# Altium footprint library Verdin Development Board.PcbLib: 154 footprints (part 6 of 10)
Each footprint in its own frame and in the unit in brackets; x right, y up, seen from the top. Pads: shape width x height; smd on the part's side, far side on the other; paste and mask are expansions set on the pad; w line width, h text height; cw(c..) or ccw(c..) is an arc to the next point about the centre after c.
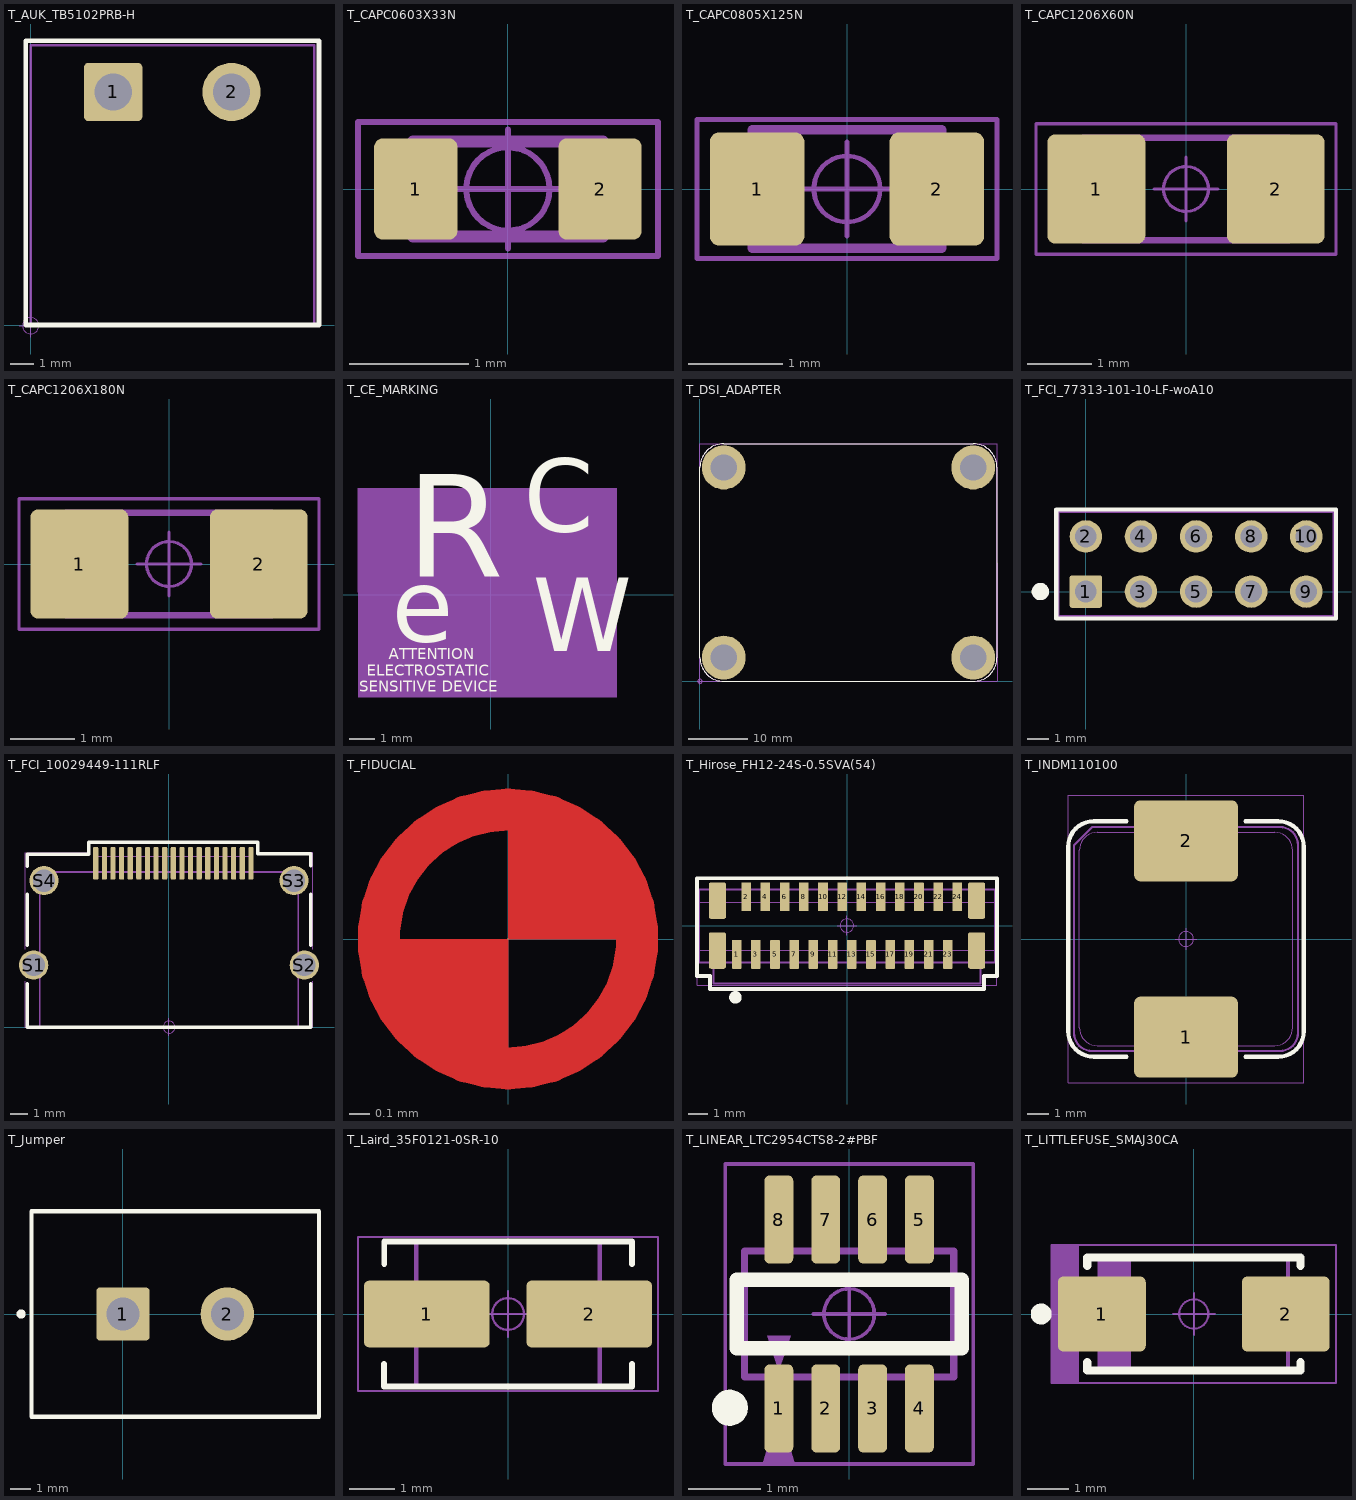
[diagram p5: the footprints below, top view; thin cyan lines are the x and y axes]

## T_AUK_TB5102PRB-H [mm]
pads (2):
  rrect15% 2.5x2.5 hole 1.6: 1(3.54,10)
  round 2.5 hole 1.6: 2(8.62,10)
Top Overlay:
  lines w0.2: -0.21,0 12.37,0 12.37,12.2 -0.21,12.2 -0.21,0
Top Component Outline:
  lines w0.05: 0,0 12.16,0 12.16,12 0,12 0,0
Top 3D Body:
  lines w0.001: 0,0 12.16,0 12.16,12 0,12 0,0
Top Dimensions:
  lines w0.1: 0,0 12.16,0 12.16,12 0,12 0,0
Top Component Center:
  circle w0.05: c0,-0.025 r0.35
  lines w0.05: -0.5,-0.025 0.5,-0.025 ; 0,-0.525 0,0.475
Top Assembly:
  text ".Designator" at 4.05,12.775 h0.75
3D body "c-796638-2-c3-3d.stp": height 8.37, standoff -3.48, extent -0.16,0 11.82,12

## T_CAPC0603X33N [mm]
pads (2):
  rrect20% 0.7x0.85 smd: 1(-0.775,0) 2(0.775,0)
Top Component Outline:
  lines w0.05: -1.261,-0.563 1.262,-0.563 1.262,0.563 -1.261,0.563 -1.261,-0.563
Top 3D Body:
  lines w0.001: -0.8,-0.4 0.8,-0.4 0.8,0.4 -0.8,0.4 -0.8,-0.4
Top Dimensions:
  lines w0.1: -0.8,-0.4 0.8,-0.4 0.8,0.4 -0.8,0.4 -0.8,-0.4
Top Component Center:
  circle w0.05: c0,0 r0.35
  lines w0.05: -0.5,0 0.5,0 ; 0,-0.5 0,0.5
Top Assembly:
  text ".Designator" at -1.3,0.8 h0.75
3D body "User Library-CAPC1608X09.step": height 0.9, standoff 0, extent -0.8,-0.4 0.8,0.4

## T_CAPC0805X125N [mm]
pads (2):
  rrect20% 1x1.2 smd: 1(-0.95,0) 2(0.95,0)
Top Component Outline:
  lines w0.05: -1.586,-0.736 1.586,-0.736 1.586,0.736 -1.586,0.736 -1.586,-0.736
Top 3D Body:
  lines w0.001: -1,-0.625 -1,0.625 1,0.625 1,-0.625 -1,-0.625
Top Dimensions:
  lines w0.1: -1,-0.625 1,-0.625 1,0.625 -1,0.625 -1,-0.625
Top Component Center:
  circle w0.05: c0,0 r0.35
  lines w0.05: -0.5,0 0.5,0 ; 0,-0.5 0,0.5
Top Assembly:
  text ".Designator" at -1.225,0.95 h0.75
3D body "User Library-CAPC2013X10.STEP": height 1, standoff 0, extent -1,-0.625 1,0.625

## T_CAPC1206X60N [mm]
pads (2):
  rrect15% 1.524x1.7 smd: 1(-1.397,0) 2(1.397,0)
Top Component Outline:
  lines w0.05: -2.337,-1.016 -2.337,1.016 2.336,1.016 2.336,-1.016 -2.337,-1.016
Top Dimensions:
  lines w0.1: -1.6,-0.8 -1.6,0.8 1.6,0.8 1.6,-0.8 -1.6,-0.8
Top Component Center:
  circle w0.05: c0,0 r0.35
  lines w0.05: -0.5,0 0.5,0 ; 0,-0.5 0,0.5
Top Assembly:
  text ".Designator" at -1.475,1.325 h0.75
3D body "c1206c225k5ractu.stp": height 1.8, standoff 0, extent -1.7,-0.9 1.7,0.9

## T_CAPC1206X180N [mm]
pads (2):
  rrect15% 1.524x1.7 smd: 1(-1.397,0) 2(1.397,0)
Top Component Outline:
  lines w0.05: -2.337,-1.016 -2.337,1.016 2.336,1.016 2.336,-1.016 -2.337,-1.016
Top 3D Body:
  lines w0.01: -1.6,-0.8 1.6,-0.8 1.6,0.8 -1.6,0.8 -1.6,-0.8
Top Dimensions:
  lines w0.1: -1.6,-0.8 -1.6,0.8 1.6,0.8 1.6,-0.8 -1.6,-0.8
Top Component Center:
  circle w0.05: c0,0 r0.35
  lines w0.05: -0.5,0 0.5,0 ; 0,-0.5 0,0.5
Top Assembly:
  text ".Designator" at -1.475,1.325 h0.75
3D body "capacitor 1206.step": height 1, standoff 0, extent -1.6,-0.8 1.6,0.8

## T_CE_MARKING [mm] "Silkscreen CE Marking"
Top Overlay:
  text "R" at -3.353,-0.61 h7
  text "C" at 1.329,1.549 h5
  text "e" at -3.941,-2.819 h5
  text "W" at 1.676,-3.2 h5
  text "SENSITIVE DEVICE" at -5.232,-4.013 h0.75
  text "ELECTROSTATIC" at -4.939,-3.378 h0.75
  text "ATTENTION" at -4.06,-2.718 h0.75
Top 3D Body:
  region: -5.283,4.242 5.029,4.242 5.029,-4.089 -5.283,-4.089

## T_DSI_ADAPTER [mm]
pads (4):
  round 7.4 / inner round 5.3 / far side round 0 hole 4.4 unplated: ""(4,4) ""(4,36) ""(46,4) ""(46,36)
Top Overlay:
  lines w0.2: 0,4 ccw(c4,4) 4,0 46,0 ccw(c46,4) 50,4 50,36 ccw(c46,36) 46,40 4,40 ccw(c4,36) 0,36 0,4
Top Paste:
  drawing of 16 lines, arcs and shapes, not listed
Top 3D Body:
  lines w0.01: 0,0 50,0 50,40 0,40 0,0
Top Dimensions:
  lines w0.1: 0,4 ccw(c4,4) 4,0 46,0 ccw(c46,4) 50,4 50,36 ccw(c46,36) 46,40 4,40 ccw(c4,36) 0,36 0,4
Top Component Center:
  circle w0.05: c46,4 r0.35
  circle w0.05: c46,36 r0.35
  circle w0.05: c4,36 r0.35
  circle w0.05: c4,4 r0.35
  circle w0.05: c0,0 r0.35
  lines w0.05: -0.5,0 0.5,0 ; 0,-0.5 0,0.5 ; 3.5,4 4.5,4 ; 3.5,36 4.5,36 ; 4,3.5 4,4.5 ; 4,35.5 4,36.5 ; 45.5,4 46.5,4 ; 45.5,36 46.5,36 ; 46,3.5 46,4.5 ; 46,35.5 46,36.5
3D body "9774080360R (rev1).stp": height 8.01, standoff -1.39, extent 1,33 7,39
3D body "9774080360R (rev1).stp": height 8.01, standoff -1.39, extent 43,33 49,39
3D body "9774080360R (rev1).stp": height 8.01, standoff -1.39, extent 43,1 49,7
3D body "9774080360R (rev1).stp": height 8.01, standoff -1.39, extent 1,1 7,7

## T_FCI_77313-101-10-LF-woA10 [mm] "2.54 mm header"
height 10.8
pads (10):
  rrect15% 1.5x1.5 hole 1: 1(0,0)
  round 1.5 hole 1: 2(0,2.54) 3(2.54,0) 4(2.54,2.54) 5(5.08,0) 6(5.08,2.54) 7(7.62,0) 8(7.62,2.54) 9(10.16,0) 10(10.16,2.54)
Top Overlay:
  circle w0.4: c-2.1,0 r0.2
  lines w0.2: -1.372,-1.245 -1.372,3.785 11.532,3.785 11.532,-1.245 -1.372,-1.245
Top Component Outline:
  lines w0.05: -1.372,-1.245 -1.372,3.785 11.532,3.785 11.532,-1.245 -1.372,-1.245
Top 3D Body:
  lines w0.001: -1.27,-1.14 -1.27,3.68 11.43,3.68 11.43,-1.14 -1.27,-1.14
Top Dimensions:
  lines w0.1: -1.27,-1.14 11.43,-1.14 ; -1.27,-1.137 -1.27,3.68 11.43,3.68 11.43,-1.137
Top Component Center:
  circle w0.05: c0,0 r0.35
  lines w0.05: -0.5,0 0.5,0 ; 0,-0.5 0,0.5
Top Assembly:
  text ".Designator" at 3.6,4 h0.75
3D body "77313-101-10lf.stp": height 8.39, standoff -2.41, extent -1.07,-1.145 11.23,3.685

## T_FCI_10029449-111RLF [mm]
pads (23):
  rrect50% 0.3x1.9 smd: 1(4.75,9.5) 2(4.25,9.5) 3(3.75,9.5) 4(3.25,9.5) 5(2.75,9.5) 6(2.25,9.5) 7(1.75,9.5) 8(1.25,9.5) 9(0.75,9.5) 10(0.25,9.5) 11(-0.25,9.5) 12(-0.75,9.5) 13(-1.25,9.5) 14(-1.75,9.5) 15(-2.25,9.5) 16(-2.75,9.5) 17(-3.25,9.5) 18(-3.75,9.5) 19(-4.25,9.5)
  round 1.7 hole 1.3: S1(-7.85,3.6) S2(7.85,3.6) S3(7.25,8.5) S4(-7.25,8.5)
Top Overlay:
  lines w0.2: -8.225,2.525 -8.225,0 8.225,0 8.225,2.525 ; -8.225,4.745 -8.225,7.7 ; -8.225,9.315 -8.225,10.025 -4.65,10.025 -4.65,10.72 5.15,10.72 5.15,10.055 8.225,10.055 8.225,9.345 ; 8.225,4.745 8.225,7.7
Top Paste:
  circle w1: c-7.85,3.6 r0.351
  circle w1: c7.85,3.6 r0.351
  circle w1: c7.25,8.5 r0.351
  circle w1: c-7.25,8.5 r0.351
Top Component Outline:
  lines w0.05: -8.325,2.66 -8.325,0 8.325,0 8.325,2.66 ; -8.325,4.525 -8.325,10.125 -4.65,10.125 -4.65,10.695 5.15,10.695 5.15,10.15 8.325,10.15 8.325,4.525
Top 3D Body:
  lines w0.01: -7.5,0 7.5,0 ; -7.5,0 -7.5,9 ; -7.5,0 7.5,0 ; -7.5,0 -7.5,9 ; -7.5,9 7.5,9 ; -7.5,9 7.5,9 ; -4.35,9.9 -4.35,9 -4.35,9.9 ; -4.35,9.9 4.85,9.9 ; -4.35,9.9 4.85,9.9 ; 4.85,9.9 4.85,9 4.85,9.9 ; 7.5,0 7.5,9 ; 7.5,0 7.5,9
Top Dimensions:
  lines w0.1: -7.5,0 7.5,0 7.5,9 -7.5,9 -7.5,0
Top Component Center:
  circle w0.05: c0,0 r0.35
  lines w0.05: -0.5,0 0.5,0 ; 0,-0.5 0,0.5
Top Assembly:
  text ".Designator" at -1.875,11.15 h0.75
3D body "10029449-111RLF.STEP": height 6.17, standoff -1.83, extent -8.1,0 8.1,9.85

## T_FIDUCIAL [mm]
pads (1):
  round 0.001 smd: ""(0,0)
Top Layer:
  region: 0,0 0,0.6 0.119,0.6 0.34,0.509 0.509,0.34 0.6,0.119 0.6,0
  region: 0,0 0,-0.6 -0.119,-0.6 -0.34,-0.509 -0.509,-0.34 -0.6,-0.119 -0.6,0
  lines w0.203: 0,-0.625 cw(c0,0) 0,0.625 cw(c0,0) 0,-0.625
Top Solder:
  circle w0.203: c0,0 r0.625
  region: -0.725,0 -0.725,0.071 -0.697,0.211 -0.642,0.343 -0.563,0.462 -0.462,0.563 -0.343,0.642 -0.211,0.697 -0.071,0.725 0,0.725 0.071,0.725 0.211,0.697 0.343,0.642 0.462,0.563 0.563,0.462 0.642,0.343 0.697,0.211 0.725,0.071 0.725,0 0.725,-0.071 0.697,-0.211 0.642,-0.343 0.563,-0.462 0.462,-0.563 0.343,-0.642 0.211,-0.697 0.071,-0.725 0,-0.725 -0.071,-0.725 -0.211,-0.697 -0.343,-0.642 -0.462,-0.563 -0.563,-0.462 -0.642,-0.343 -0.697,-0.211 -0.725,-0.071
  region: -0.7,0.1
  region: 0,0
  region: -0.7,0

## T_Hirose_FH12-24S-0.5SVA(54) [mm] "FFC Connector 0.5mm pitch Vertical"
height 5.5
pads (28):
  rrect12% 0.5x1.5 smd: 1(-5.75,-1.5) 2(-5.25,1.5) 3(-4.75,-1.5) 4(-4.25,1.5) 5(-3.75,-1.5) 6(-3.25,1.5) 7(-2.75,-1.5) 8(-2.25,1.5) 9(-1.75,-1.5) 10(-1.25,1.5) 11(-0.75,-1.5) 12(-0.25,1.5) 13(0.25,-1.5) 14(0.75,1.5) 15(1.25,-1.5) 16(1.75,1.5) 17(2.25,-1.5) 18(2.75,1.5) 19(3.25,-1.5) 20(3.75,1.5) 21(4.25,-1.5) 22(4.75,1.5) 23(5.25,-1.5) 24(5.75,1.5)
  rrect25% 0.9x1.9 smd: ""(-6.75,-1.3) ""(-6.75,1.3) ""(6.75,-1.3) ""(6.75,1.3)
Top Overlay:
  circle w0.4: c-5.81,-3.738 r0.125
  lines w0.2: -7.814,-2.625 -7.814,2.464 7.814,2.464 7.814,-2.625 7.132,-2.625 7.132,-3.307 -7.132,-3.307 -7.132,-2.625 -7.814,-2.625
Top Component Outline:
  lines w0.05: -7.8,-3.116 7.8,-3.116 7.8,2.416 -7.8,2.416 -7.8,-3.116
Top 3D Body:
  lines w0.001: -6.95,-1.925 -6.95,-3.025 6.95,-3.025 6.95,-1.925
  lines w0.01: -7.7,-1.275 7.7,-1.275 ; -7.7,1.225 7.7,1.225 ; -7.7,-1.925 7.7,-1.925 7.7,1.875 -7.7,1.875 -7.7,-1.925
Top Dimensions:
  lines w0.1: -6.95,-1.925 -6.95,-3.025 6.95,-3.025 6.95,-1.925 ; -7.7,-1.925 7.7,-1.925 7.7,1.875 -7.7,1.875 -7.7,-1.925
Top Component Center:
  circle w0.05: c0,0 r0.35
  lines w0.05: -0.5,0 0.5,0 ; 0,-0.5 0,0.5
Top Assembly:
  text ".Designator" at -1.48,-0.22 h0.75
3D body "FH12-24S-0.5SV.stp": height 5.52, standoff 0.02, extent -7.7,-1.925 7.7,1.875

## T_INDM110100 [mm]
pads (2):
  rrect15% 4.86x3.8 smd: 1(0,-4.6) 2(0,4.6)
Top Overlay:
  lines w0.2: -2.794,-5.523 -4.32,-5.523 cw(c-4.32,-4.32) -5.523,-4.32 -5.523,4.32 cw(c-4.32,4.32) -4.32,5.523 -2.794,5.523 ; 2.794,-5.523 4.32,-5.523 ccw(c4.32,-4.32) 5.523,-4.32 5.523,4.343 ; 2.794,5.523 4.32,5.523 cw(c4.32,4.32) 5.523,4.32
Top Component Outline:
  lines w0.05: -5.52,-6.731 -5.52,6.731 5.52,6.731 5.52,-6.731 -5.52,-6.731
Top 3D Body:
  lines w0.001: -5,-4.15 ccw(c-4.15,-4.15) -4.15,-5 4.15,-5 ccw(c4.15,-4.15) 5,-4.15 5,4.15 ccw(c4.15,4.15) 4.15,5 -4.15,5 ccw(c-4.15,4.15) -5,4.15 -5,-4.15 ; -1.6,3.2 1.4,3.2 1.4,5.5 -1.6,5.5 -1.6,3.2 ; -1.5,-5.5 -1.5,-3.2 1.5,-3.2 1.5,-5.5 -1.5,-5.5
Top Dimensions:
  lines w0.1: -5.25,-4.4 ccw(c-4.4,-4.4) -4.4,-5.25 4.4,-5.25 ccw(c4.4,-4.4) 5.25,-4.4 5.25,4.4 ccw(c4.4,4.4) 4.4,5.25 -4.4,5.25 -5.25,4.4 -5.25,-4.4
Top Component Center:
  circle w0.05: c0,0 r0.35
  lines w0.05: -0.5,0 0.5,0 ; 0,-0.5 0,0.5
Top Assembly:
  text ".Designator" at -2.075,7.175 h0.75
3D body "User Library-SRP 1038A.step": height 3.8, standoff -0.2, extent -5,-5.2 5,5.2

## T_Jumper [mm]
pads (2):
  rrect15% 2.6x2.6 hole 1.6: 1(0,0)
  round 2.6 hole 1.6: 2(5.08,0)
Top Overlay:
  circle w0.25: c-4.96,0 r0.1
  lines w0.2: -4.46,-5 9.54,-5 9.54,5 -4.46,5 -4.46,-5
Top Component Outline:
  lines w0.05: -4.46,-5 -4.46,5 9.54,5 9.54,-5 -4.46,-5
Top 3D Body:
  lines w0.001: -4.46,-5 -4.46,5 9.54,5 9.54,-5 -4.46,-5
Top Dimensions:
  lines w0.1: -4.46,-5 9.54,-5 9.54,5 -4.46,5 -4.46,-5
Top Component Center:
  circle w0.05: c0,0 r0.35
  lines w0.05: -0.5,0 0.5,0 ; 0,-0.5 0,0.5
Top Assembly:
  text ".Designator" at 0.54,5.5 h0.75

## T_Laird_35F0121-0SR-10 [mm]
pads (2):
  rrect15% 2.77x1.47 smd: 1(-1.79,0) 2(1.79,0)
Top Overlay:
  lines w0.127: -2.732,-1.102 -2.732,-1.599 2.73,-1.599 2.73,-1.104 ; -2.729,1.104 -2.729,1.599 2.73,1.599 2.73,1.104
Top Component Outline:
  lines w0.05: -3.306,-1.695 -3.306,1.695 3.305,1.695 3.305,-1.695 -3.306,-1.695
Top 3D Body:
  lines w0.001: -2.025,-1.6 -2.025,1.6 2.025,1.6 2.025,-1.6 -2.025,-1.6
Top Dimensions:
  lines w0.1: -2.025,-1.6 2.025,-1.6 2.025,1.6 -2.025,1.6 -2.025,-1.6
Top Component Center:
  circle w0.05: c0,0 r0.35
  lines w0.05: -0.5,0 0.5,0 ; 0,-0.5 0,0.5
Top Assembly:
  text ".Designator" at -1.575,2.025 h0.75
3D body "test-14.step": height 3.05, standoff 0, extent -2.3,-1.59 2.3,1.59

## T_LINEAR_LTC2954CTS8-2#PBF [mm]
pads (8):
  rrect35% 0.4x1.22 smd: 1(-0.975,-1.31) 2(-0.325,-1.31) 3(0.325,-1.31) 4(0.975,-1.31) 5(0.975,1.31) 6(0.325,1.31) 7(-0.325,1.31) 8(-0.975,1.31)
Top Overlay:
  circle w0.25: c-1.655,-1.3 r0.125
  lines w0.2: -1.56,-0.475 -1.56,0.475 1.56,0.475 1.56,-0.475 -1.56,-0.475
Top Component Outline:
  region: -0.762,-2.05 -0.975,-1.34 -1.188,-2.05
  lines w0.05: -1.72,-2.08 1.72,-2.08 ; -1.72,-2.07 -1.72,2.08 1.72,2.08 1.72,-2.07
Top 3D Body:
  lines w0.001: -1.45,-0.875 1.45,-0.875 1.45,0.875 -1.45,0.875 -1.45,-0.875
Top Dimensions:
  region: -0.975,-0.785 -1.137,-0.3 -0.813,-0.3
  lines w0.1: -1.45,-0.875 1.45,-0.875 1.45,0.875 -1.45,0.875 -1.45,-0.875
Top Component Center:
  circle w0.05: c0,0 r0.35
  lines w0.05: -0.5,0 0.5,0 ; 0,-0.5 0,0.5
Top Assembly:
  text ".Designator" at -1.905,2.388 h0.75
3D body "test-15.step": height 1, standoff 0, extent -1.45,-1.4 1.45,1.4

## T_LITTLEFUSE_SMAJ30CA [mm]
pads (2):
  rrect15% 2.1x1.8 smd: 1(-2.2,0) 2(2.2,0)
Top Overlay:
  circle w0.25: c-3.65,0 r0.125
  lines w0.2: -2.55,-1.15 -2.55,-1.35 2.55,-1.35 2.55,-1.15 ; -2.55,1.15 -2.55,1.35 2.55,1.35 2.55,1.15
Top Component Outline:
  rectangle: -3.4,-1.65 -2.775,1.65
  lines w0.05: -2.775,-1.65 -2.775,1.65 ; -3.4,-1.65 3.4,-1.65 3.4,1.65 -3.4,1.65 -3.4,-1.65
Top 3D Body:
  lines w0.001: -2.25,-1.395 2.25,-1.395 2.25,1.395 -2.25,1.395 -2.25,-1.395
Top Dimensions:
  region: -3.4,1.65
  lines w0.1: -2.25,-1.332 -2.25,1.375 2.25,1.375 2.25,-1.375 -2.25,-1.375 -2.25,1.284 -2.202,1.332 ; -2.152,-1.332 -2.152,1.332 ; -2.052,-1.332 -2.052,1.332 ; -1.952,-1.332 -1.952,1.332 ; -1.852,-1.332 -1.852,1.332 ; -1.752,-1.332 -1.752,1.332 ; -1.652,-1.332 -1.652,1.332 ; -1.552,-1.332 -1.552,1.332
Top Component Center:
  circle w0.05: c0,0 r0.35
  lines w0.05: -0.5,0 0.5,0 ; 0,-0.5 0,0.5
Top Assembly:
  text ".Designator" at -1.675,1.975 h0.75
3D body "test-16.step": height 2.29, standoff 0, extent -2.52,-1.395 2.52,1.395